# Altium footprint library 1984950.PcbLib: 1 footprints
Each footprint in its own frame and in the unit in brackets; x right, y up, seen from the top. Pads: shape width x height; smd on the part's side, far side on the other; paste and mask are expansions set on the pad; w line width, h text height; cw(c..) or ccw(c..) is an arc to the next point about the centre after c.
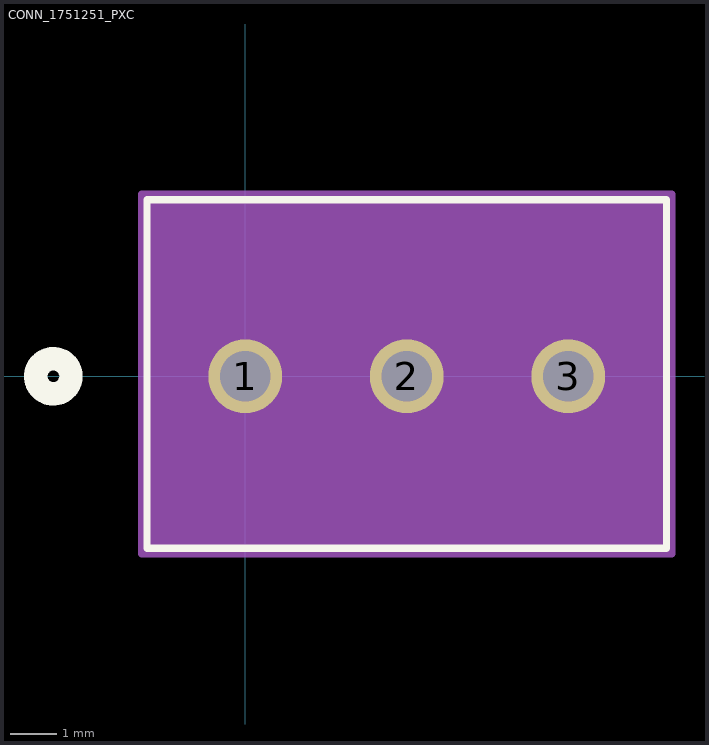
[diagram p0: the footprint, top view; thin cyan lines are the x and y axes]

## CONN_1751251_PXC [mil]
pads (3):
  round 63 hole 43 paste-31.5 mask+0: 1(0,0) 2(137.8,0) 3(275.59,0)
Top Overlay:
  circle w20: c-163.74,0 r15
  lines w6: -83.74,-146.73 359.33,-146.73 359.33,150.67 -83.74,150.67 -83.74,-146.73
  text ".Designator" at 0.3,-25 h50
Bottom Overlay:
  circle w20: c-163.74,0 r15
Mechanical 13:
  circle w20: c0,0 r15
  lines w1: -78.74,-141.73 354.33,-141.73 354.33,145.67 -78.74,145.67 -78.74,-141.73
  text ".Designator" at 0.3,-25 h50
Mechanical 15:
  region: 364.33,155.67 -88.74,155.67 -88.74,-151.73 364.33,-151.73
  lines w6: -88.74,-151.73 -88.74,155.67 364.33,155.67 364.33,-151.73 -88.74,-151.73